# Altium schematic symbol library LTST-C191KGKT.SchLib: 1 symbol
Pins are listed as number, name and electrical type; pins without a type are passive.

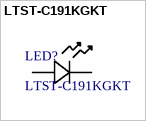
[diagram p0: symbol LTST-C191KGKT]

## LTST-C191KGKT
designator LED?
Description; Manufacturer_Name: LITE-ON; Type: LED Indication; Copyright: Copyright (C) 2025 Ultra Librarian. All rights reserved.; Manufacturer_Part_Number: LTST-C191KGKT
footprint LED_LTST-C191KGKT_LTO
pins: 1 CATHODE, 2 ANODE